# Altium footprint library Switch-TactileButton.PcbLib: 78 footprints (part 5 of 5)
Each footprint in its own frame and in the unit in brackets; x right, y up, seen from the top. Pads: shape width x height; smd on the part's side, far side on the other; paste and mask are expansions set on the pad; w line width, h text height; cw(c..) or ccw(c..) is an arc to the next point about the centre after c.
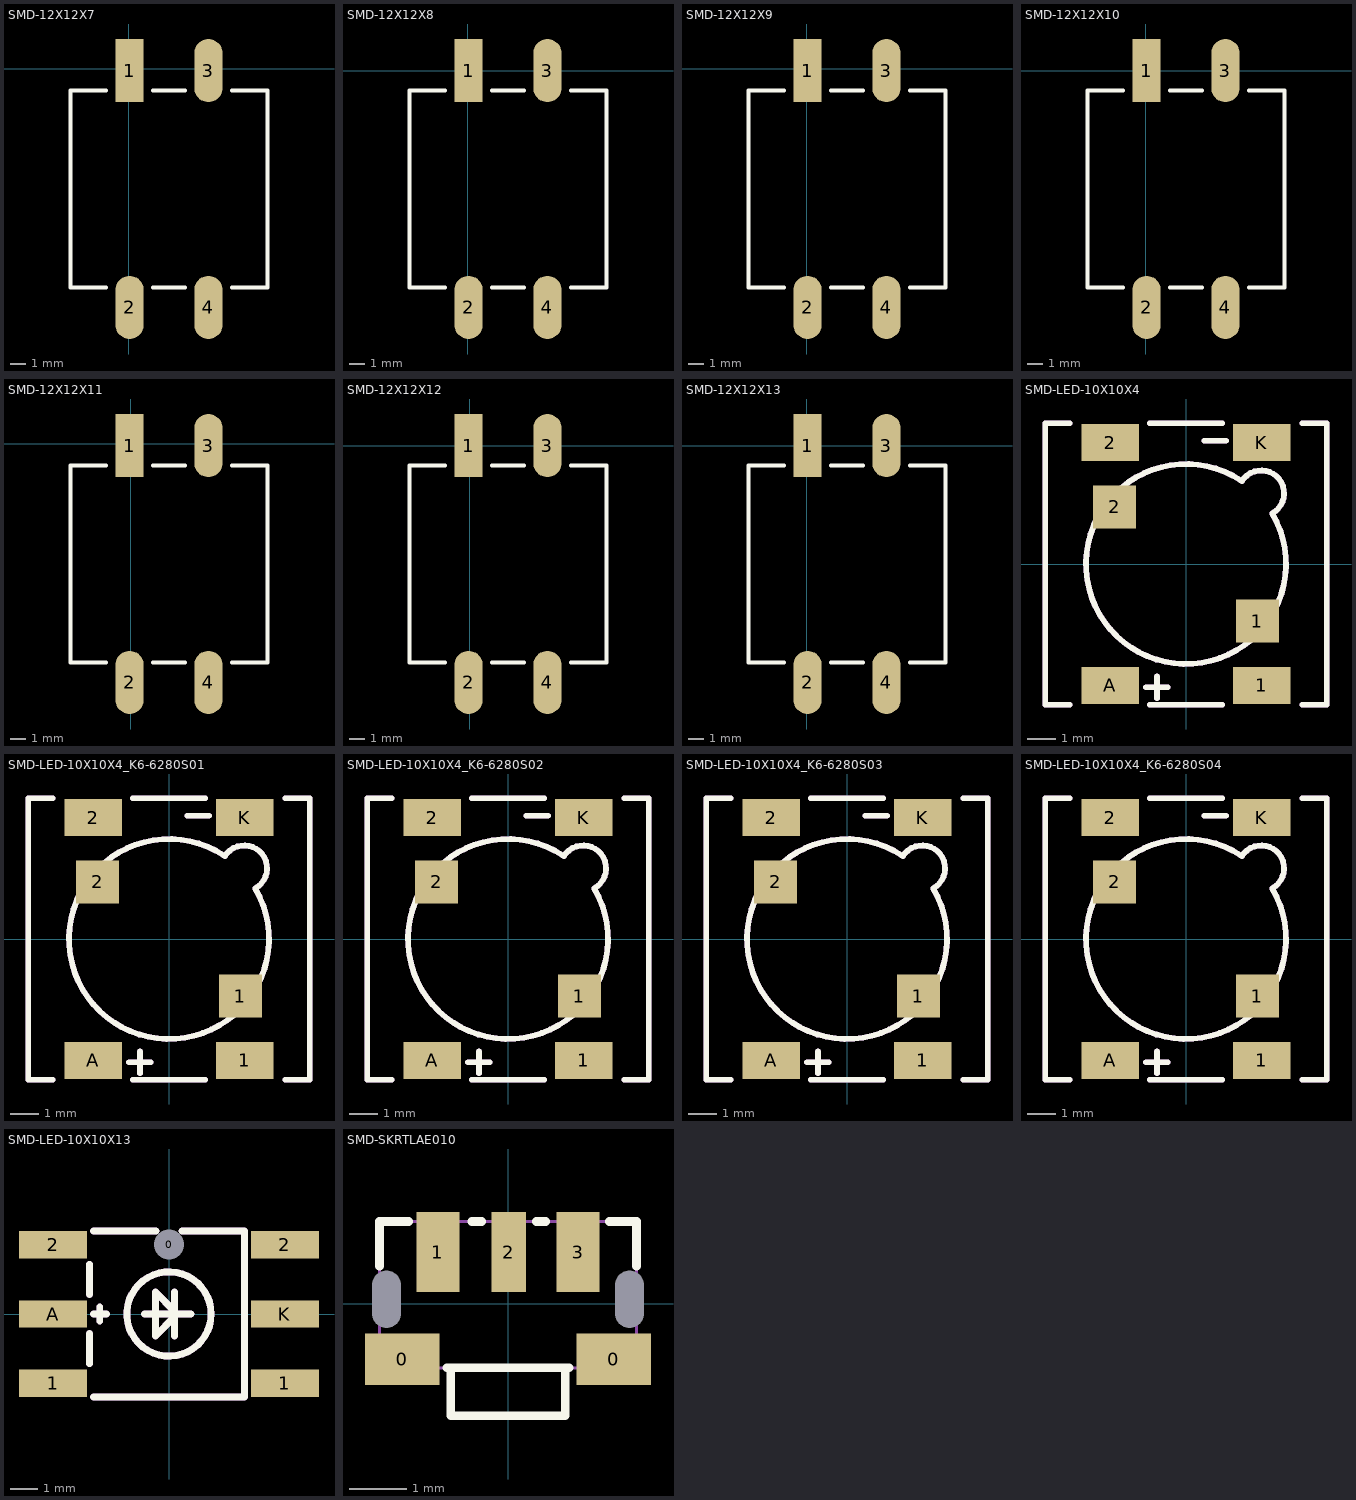
[diagram p4: the footprints below, top view; thin cyan lines are the x and y axes]

## SMD-12X12X7 [mm]
pads (4):
  rect 1.8x4 smd: 1(0.04,-0.12)
  oval 1.8x4 smd: 2(0.04,-15.12) 3(5.04,-0.12) 4(5.04,-15.12)
Top Overlay:
  lines w0.254: -1.46,-13.87 -3.71,-13.87 -3.71,-1.37 -1.46,-1.37 ; 1.54,-13.87 3.54,-13.87 ; 1.54,-1.37 3.54,-1.37 ; 6.54,-13.87 8.79,-13.87 8.79,-1.37 6.54,-1.37
3D body "SMD-12X12X7.STEP": height 7.15, standoff 0, extent -3.587,-15.113 8.413,0.087

## SMD-12X12X8 [mm] "12*12*8mm"
pads (4):
  rect 1.8x4 smd: 1(0.04,0.007)
  oval 1.8x4 smd: 2(0.04,-14.993) 3(5.04,0.007) 4(5.04,-14.993)
Top Overlay:
  lines w0.254: -1.46,-13.743 -3.71,-13.743 -3.71,-1.243 -1.46,-1.243 ; 1.54,-13.743 3.54,-13.743 ; 1.54,-1.243 3.54,-1.243 ; 6.54,-13.743 8.79,-13.743 8.79,-1.243 6.54,-1.243
3D body "SMD-12X12X8.STEP": height 8.15, standoff 0, extent -3.714,-14.859 8.286,0.341

## SMD-12X12X9 [mm]
pads (4):
  rect 1.8x4 smd: 1(0.04,-0.12)
  oval 1.8x4 smd: 2(0.04,-15.12) 3(5.04,-0.12) 4(5.04,-15.12)
Top Overlay:
  lines w0.254: -1.46,-13.87 -3.71,-13.87 -3.71,-1.37 -1.46,-1.37 ; 1.54,-13.87 3.54,-13.87 ; 1.54,-1.37 3.54,-1.37 ; 6.54,-13.87 8.79,-13.87 8.79,-1.37 6.54,-1.37
3D body "SMD-12X12X9.STEP": height 9.15, standoff 0, extent -3.491,-15.22 8.509,-0.02

## SMD-12X12X10 [mm]
pads (4):
  rect 1.8x4 smd: 1(0.04,0.007)
  oval 1.8x4 smd: 2(0.04,-14.993) 3(5.04,0.007) 4(5.04,-14.993)
Top Overlay:
  lines w0.254: -1.46,-13.743 -3.71,-13.743 -3.71,-1.243 -1.46,-1.243 ; 1.54,-13.743 3.54,-13.743 ; 1.54,-1.243 3.54,-1.243 ; 6.54,-13.743 8.79,-13.743 8.79,-1.243 6.54,-1.243
3D body "SMD-12X12X10.STEP": height 10.15, standoff 0, extent -3.491,-14.966 8.509,0.234

## SMD-12X12X11 [mm]
pads (4):
  rect 1.8x4 smd: 1(-0.087,-0.12)
  oval 1.8x4 smd: 2(-0.087,-15.12) 3(4.913,-0.12) 4(4.913,-15.12)
Top Overlay:
  lines w0.254: -1.587,-13.87 -3.837,-13.87 -3.837,-1.37 -1.587,-1.37 ; 1.413,-13.87 3.413,-13.87 ; 1.413,-1.37 3.413,-1.37 ; 6.413,-13.87 8.663,-13.87 8.663,-1.37 6.413,-1.37
3D body "SMD-12X12X11.STEP": height 11.15, standoff 0, extent -3.683,-15.22 8.317,-0.02

## SMD-12X12X12 [mm] "12*12*12mm"
pads (4):
  rect 1.8x4 smd: 1(-0.087,0.007)
  oval 1.8x4 smd: 2(-0.087,-14.993) 3(4.913,0.007) 4(4.913,-14.993)
Top Overlay:
  lines w0.254: -1.587,-13.743 -3.837,-13.743 -3.837,-1.243 -1.587,-1.243 ; 1.413,-13.743 3.413,-13.743 ; 1.413,-1.243 3.413,-1.243 ; 6.413,-13.743 8.663,-13.743 8.663,-1.243 6.413,-1.243
3D body "SMD-12X12X12.STEP": height 12.15, standoff 0, extent -3.683,-14.966 8.317,0.234

## SMD-12X12X13 [mm]
pads (4):
  rect 1.8x4 smd: 1(0.04,0.007)
  oval 1.8x4 smd: 2(0.04,-14.993) 3(5.04,0.007) 4(5.04,-14.993)
Top Overlay:
  lines w0.254: -1.46,-13.743 -3.71,-13.743 -3.71,-1.243 -1.46,-1.243 ; 1.54,-13.743 3.54,-13.743 ; 1.54,-1.243 3.54,-1.243 ; 6.54,-13.743 8.79,-13.743 8.79,-1.243 6.54,-1.243
3D body "SMD-12X12X13.STEP": height 13.15, standoff 0, extent -3.429,-14.966 8.571,0.234

## SMD-LED-10X10X4 [mm] "CHAU-HUA   C3001 SERIES"
pads (6):
  rect 1.5x1.5 smd: 1(2.5,-2) 2(-2.5,2)
  rect 2x1.3 smd: 1(2.65,-4.25) 2(-2.65,4.25) A(-2.65,-4.25) K(2.65,4.25)
Top Overlay:
  lines w0.2: -4.064,-4.925 -4.925,-4.925 -4.925,4.925 -4.064,4.925 ; -1.397,-4.318 -0.635,-4.318 ; -1.27,-4.925 1.27,-4.925 ; -1.27,4.925 1.27,4.925 ; -1.016,-4.699 -1.016,-3.937 ; 0.635,4.318 1.397,4.318 ; 1.924,2.924 ccw(c0,0) 3.017,1.773 ccw(c2.633,2.475) 1.957,2.903 ; 4.064,-4.925 4.925,-4.925 4.925,4.925 4.064,4.925
Top Value:
  text "'.Comment'" at -4.346,-0.578 h2
Top Designator:
  text "'.Designator'" at -5.626,-0.416 h2
Top Assembly (Mech20):
  lines w0.2: -4.064,-4.925 -4.925,-4.925 -4.925,4.925 -4.064,4.925 ; -1.397,-4.318 -0.635,-4.318 ; -1.27,-4.925 1.27,-4.925 ; -1.27,4.925 1.27,4.925 ; -1.016,-4.699 -1.016,-3.937 ; 0.635,4.318 1.397,4.318 ; 1.924,2.924 ccw(c0,0) 3.017,1.773 ccw(c2.633,2.475) 1.957,2.903 ; 4.064,-4.925 4.925,-4.925 4.925,4.925 4.064,4.925
3D body "K6-6280S01.step": height 4, standoff -0.02, extent -5,-5 5.01,5

## SMD-LED-10X10X4_K6-6280S01 [mm] "韩国韩荣 K6-6280S0系列"
pads (6):
  rect 1.5x1.5 smd: 1(2.5,-2) 2(-2.5,2)
  rect 2x1.3 smd: 1(2.65,-4.25) 2(-2.65,4.25) A(-2.65,-4.25) K(2.65,4.25)
Top Overlay:
  lines w0.2: -4.064,-4.925 -4.925,-4.925 -4.925,4.925 -4.064,4.925 ; -1.397,-4.318 -0.635,-4.318 ; -1.27,-4.925 1.27,-4.925 ; -1.27,4.925 1.27,4.925 ; -1.016,-4.699 -1.016,-3.937 ; 0.635,4.318 1.397,4.318 ; 1.924,2.924 ccw(c0,0) 3.017,1.773 ccw(c2.633,2.475) 1.957,2.903 ; 4.064,-4.925 4.925,-4.925 4.925,4.925 4.064,4.925
Top Value:
  text "'.Comment'" at -4.346,-0.578 h2
Top Designator:
  text "'.Designator'" at -5.626,-0.416 h2
Top Assembly (Mech20):
  lines w0.2: -4.064,-4.925 -4.925,-4.925 -4.925,4.925 -4.064,4.925 ; -1.397,-4.318 -0.635,-4.318 ; -1.27,-4.925 1.27,-4.925 ; -1.27,4.925 1.27,4.925 ; -1.016,-4.699 -1.016,-3.937 ; 0.635,4.318 1.397,4.318 ; 1.924,2.924 ccw(c0,0) 3.017,1.773 ccw(c2.633,2.475) 1.957,2.903 ; 4.064,-4.925 4.925,-4.925 4.925,4.925 4.064,4.925
3D body "K6-6280S01.step": height 4, standoff -0.02, extent -5,-5 5.01,5

## SMD-LED-10X10X4_K6-6280S02 [mm] "韩国韩荣 K6-6280S0系列"
pads (6):
  rect 1.5x1.5 smd: 1(2.5,-2) 2(-2.5,2)
  rect 2x1.3 smd: 1(2.65,-4.25) 2(-2.65,4.25) A(-2.65,-4.25) K(2.65,4.25)
Top Overlay:
  lines w0.2: -4.064,-4.925 -4.925,-4.925 -4.925,4.925 -4.064,4.925 ; -1.397,-4.318 -0.635,-4.318 ; -1.27,-4.925 1.27,-4.925 ; -1.27,4.925 1.27,4.925 ; -1.016,-4.699 -1.016,-3.937 ; 0.635,4.318 1.397,4.318 ; 1.924,2.924 ccw(c0,0) 3.017,1.773 ccw(c2.633,2.475) 1.957,2.903 ; 4.064,-4.925 4.925,-4.925 4.925,4.925 4.064,4.925
Top Value:
  text "'.Comment'" at -4.346,-0.578 h2
Top Designator:
  text "'.Designator'" at -5.626,-0.416 h2
Top Assembly (Mech20):
  lines w0.2: -4.064,-4.925 -4.925,-4.925 -4.925,4.925 -4.064,4.925 ; -1.397,-4.318 -0.635,-4.318 ; -1.27,-4.925 1.27,-4.925 ; -1.27,4.925 1.27,4.925 ; -1.016,-4.699 -1.016,-3.937 ; 0.635,4.318 1.397,4.318 ; 1.924,2.924 ccw(c0,0) 3.017,1.773 ccw(c2.633,2.475) 1.957,2.903 ; 4.064,-4.925 4.925,-4.925 4.925,4.925 4.064,4.925
3D body "K6-6280S02.step": height 4, standoff -0.02, extent -5,-5 5.01,5

## SMD-LED-10X10X4_K6-6280S03 [mm] "韩国韩荣 K6-6280S0系列"
pads (6):
  rect 1.5x1.5 smd: 1(2.5,-2) 2(-2.5,2)
  rect 2x1.3 smd: 1(2.65,-4.25) 2(-2.65,4.25) A(-2.65,-4.25) K(2.65,4.25)
Top Overlay:
  lines w0.2: -4.064,-4.925 -4.925,-4.925 -4.925,4.925 -4.064,4.925 ; -1.397,-4.318 -0.635,-4.318 ; -1.27,-4.925 1.27,-4.925 ; -1.27,4.925 1.27,4.925 ; -1.016,-4.699 -1.016,-3.937 ; 0.635,4.318 1.397,4.318 ; 1.924,2.924 ccw(c0,0) 3.017,1.773 ccw(c2.633,2.475) 1.957,2.903 ; 4.064,-4.925 4.925,-4.925 4.925,4.925 4.064,4.925
Top Value:
  text "'.Comment'" at -4.346,-0.578 h2
Top Designator:
  text "'.Designator'" at -5.626,-0.416 h2
Top Assembly (Mech20):
  lines w0.2: -4.064,-4.925 -4.925,-4.925 -4.925,4.925 -4.064,4.925 ; -1.397,-4.318 -0.635,-4.318 ; -1.27,-4.925 1.27,-4.925 ; -1.27,4.925 1.27,4.925 ; -1.016,-4.699 -1.016,-3.937 ; 0.635,4.318 1.397,4.318 ; 1.924,2.924 ccw(c0,0) 3.017,1.773 ccw(c2.633,2.475) 1.957,2.903 ; 4.064,-4.925 4.925,-4.925 4.925,4.925 4.064,4.925
3D body "K6-6280S03.step": height 4, standoff -0.02, extent -5,-5 5.01,5

## SMD-LED-10X10X4_K6-6280S04 [mm] "韩国韩荣 K6-6280S0系列"
pads (6):
  rect 1.5x1.5 smd: 1(2.5,-2) 2(-2.5,2)
  rect 2x1.3 smd: 1(2.65,-4.25) 2(-2.65,4.25) A(-2.65,-4.25) K(2.65,4.25)
Top Overlay:
  lines w0.2: -4.064,-4.925 -4.925,-4.925 -4.925,4.925 -4.064,4.925 ; -1.397,-4.318 -0.635,-4.318 ; -1.27,-4.925 1.27,-4.925 ; -1.27,4.925 1.27,4.925 ; -1.016,-4.699 -1.016,-3.937 ; 0.635,4.318 1.397,4.318 ; 1.924,2.924 ccw(c0,0) 3.017,1.773 ccw(c2.633,2.475) 1.957,2.903 ; 4.064,-4.925 4.925,-4.925 4.925,4.925 4.064,4.925
Top Value:
  text "'.Comment'" at -4.346,-0.578 h2
Top Designator:
  text "'.Designator'" at -5.626,-0.416 h2
Top Assembly (Mech20):
  lines w0.2: -4.064,-4.925 -4.925,-4.925 -4.925,4.925 -4.064,4.925 ; -1.397,-4.318 -0.635,-4.318 ; -1.27,-4.925 1.27,-4.925 ; -1.27,4.925 1.27,4.925 ; -1.016,-4.699 -1.016,-3.937 ; 0.635,4.318 1.397,4.318 ; 1.924,2.924 ccw(c0,0) 3.017,1.773 ccw(c2.633,2.475) 1.957,2.903 ; 4.064,-4.925 4.925,-4.925 4.925,4.925 4.064,4.925
3D body "K6-6280S04.step": height 4, standoff -0.02, extent -5,-5 5.01,5

## SMD-LED-10X10X13 [mm] "韩国韩荣 K6-6272S01"
pads (7):
  round 0.5 hole 1.1 unplated: 0(0,2.54)
  rect 2.5x1 smd: 1(-4.25,-2.54) 1(4.25,-2.54) 2(-4.25,2.54) 2(4.25,2.54) A(-4.25,0) K(4.25,0)
Top Overlay:
  circle w0.254: c0,0 r1.545
  lines w0.254: -2.921,-1.823 -2.921,-0.717 ; -2.921,0.717 -2.921,1.823 ; -2.769,-3.048 2.769,-3.048 2.769,3.048 0.47,3.048 ; -2.769,0 -2.286,0 ; -2.769,3.048 -0.47,3.048 ; -2.54,-0.254 -2.54,0.254 ; -0.9,0 0.358,0 ; 0.2,-0.8 0.2,0.8 ; 0.8,0 0.2,0 ; 0.2,0 0.2,0.1 -0.5,0.8 -0.5,-0.8 0.2,-0.1 0.2,0
Keep-Out Layer:
  circle w0.025: c0,2.54 r0.5
Top Value:
  text "'.Comment'" at -4.346,-0.578 h2
Top Designator:
  text "'.Designator'" at -5.626,-0.416 h2
Top Assembly (Mech20):
  circle w0.254: c0,0 r1.545
  lines w0.254: -2.921,-1.823 -2.921,-0.717 ; -2.921,0.717 -2.921,1.823 ; -2.769,-3.048 2.769,-3.048 2.769,3.048 0.47,3.048 ; -2.769,0 -2.286,0 ; -2.769,3.048 -0.47,3.048 ; -2.54,-0.254 -2.54,0.254 ; -0.9,0 0.358,0 ; 0.2,0 0.8,0 ; 0.2,-0.8 0.2,0.8 ; -0.5,-0.8 0.2,-0.1 0.2,0 0.2,0.1 -0.5,0.8 -0.5,-0.8
3D body "K6-6272S01.step": height 9, standoff -0.5, extent -5,-3 5,3.001

## SMD-SKRTLAE010 [mm] "SKRTLAE010 (ALPSALPINE)"
pads (7):
  round 0.1 hole 0.5 slot 1 at 90 deg unplated: 0(-2.125,0.075) 0(2.125,0.075)
  rect 1.3x0.9 smd mask+0.051: 0(-1.85,-0.975) 0(1.85,-0.975)
  rect 0.75x1.4 smd mask+0.051: 1(-1.225,0.9) 3(1.225,0.9)
  rect 0.6x1.4 smd mask+0.051: 2(0.015,0.9)
Top Overlay:
  lines w0.152: -2.25,0.654 -2.25,1.435 -1.741,1.435 ; -1.074,-1.125 -1,-1.125 ; -0.631,1.435 -0.465,1.435 ; 0.495,1.435 0.661,1.435 ; 1.074,-1.125 1,-1.125 ; 1.771,1.435 2.25,1.435 2.25,0.654 ; -1,-1.125 1,-1.125 ; -1,-1.125 -1,-1.965 1,-1.965 1,-1.125
Top Value:
  text "'.Comment'" at -4.397,-0.581 h2
Top Designator:
  text "'.Designator'" at -5.677,-0.419 h2
Top Assembly (Mech20):
  region: -2.19,1.435 -2.19,1.46 -2.225,1.495 -2.275,1.495 -2.31,1.46 -2.31,1.435 -2.31,1.41 -2.275,1.375 -2.225,1.375 -2.19,1.41 -2.19,1.435
  region: -1.55,1.435 -0.9,1.435 -0.9,0.235 -1.55,0.235
  region: 0.9,1.435 1.55,1.435 1.55,0.235 0.9,0.235
  region: -0.235,1.435 0.265,1.435 0.265,0.235 -0.235,0.235
  region: 2.25,-0.865 2.25,-1.115 1.45,-1.115 1.45,-0.865
  region: -1.45,-0.865 -1.45,-1.115 -2.25,-1.115 -2.25,-0.865
  lines w0.051: -2.25,-1.125 -2.25,1.435 2.25,1.435 2.25,-1.125 1,-1.125 1,-1.965 -1,-1.965 -1,-1.125 -2.25,-1.125
3D body "SKRTLAE010.stp": height 3.4, standoff -0.4, extent -2.241,-2.001 2.259,1.549